# Altium footprint library CHAR-112A90C.PcbLib: 1 footprints
Each footprint in its own frame and in the unit in brackets; x right, y up, seen from the top. Pads: shape width x height; smd on the part's side, far side on the other; paste and mask are expansions set on the pad; w line width, h text height; cw(c..) or ccw(c..) is an arc to the next point about the centre after c.
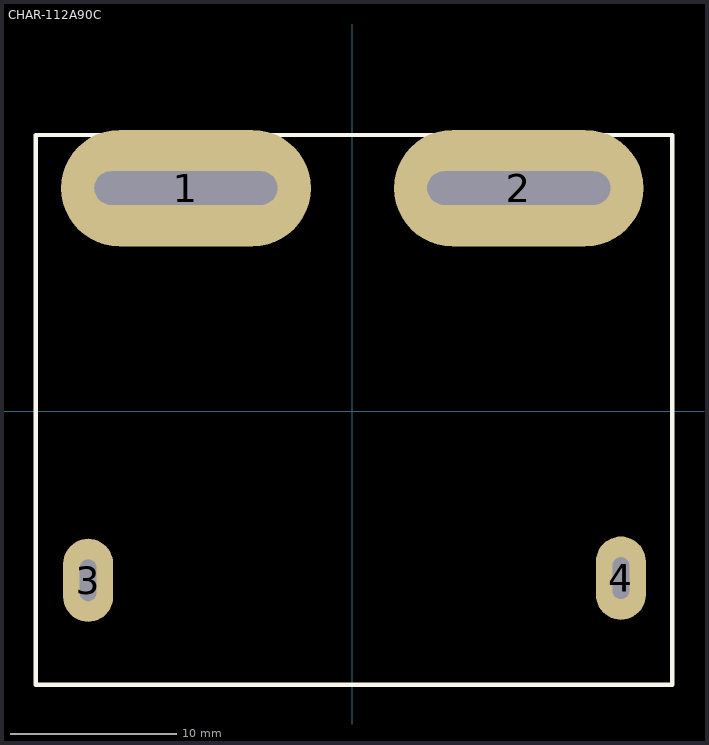
[diagram p0: the footprint, top view; thin cyan lines are the x and y axes]

## CHAR-112A90C [mm] "CHAR-112A90C"
pads (4):
  oval 15x7 hole 2 slot 11 at 0 deg: 1(-10,13.4) 2(10,13.4)
  oval 3x5 hole 1 slot 2.5 at 90 deg unplated: 3(-15.875,-10.16) 4(16.129,-10.033)
Top Overlay:
  lines w0.254: -19.018,-16.439 19.209,-16.439 19.209,16.581 -19.018,16.581 -19.018,-16.439
3D body "CHAR-112A90C.STEP": height 39.51, standoff -4, extent -19,-16.5 19,16.5